# Altium schematic symbol library FXL0630-1R5-M.SchLib: 1 symbol
Pins are listed as number, name and electrical type; pins without a type are passive.

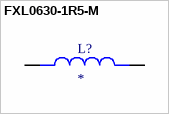
[diagram p0: symbol FXL0630-1R5-M]

## FXL0630-1R5-M
designator L?
MF: Analog Devices; MP: FXL0630-1R5-M; SnapEDA_Link: https://www.snapeda.com/parts/FXL0630-1R5-M/Analog+Devices/view-part/?ref=snap; Package: None; Value: *; Check_prices: https://www.snapeda.com/parts/FXL0630-1R5-M/Analog+Devices/view-part/?ref=eda
footprint INDM7066X300N
pins: 1, 2